# Altium footprint library PcbLib1.PcbLib: 15 footprints
Each footprint in its own frame and in the unit in brackets; x right, y up, seen from the top. Pads: shape width x height; smd on the part's side, far side on the other; paste and mask are expansions set on the pad; w line width, h text height; cw(c..) or ccw(c..) is an arc to the next point about the centre after c.
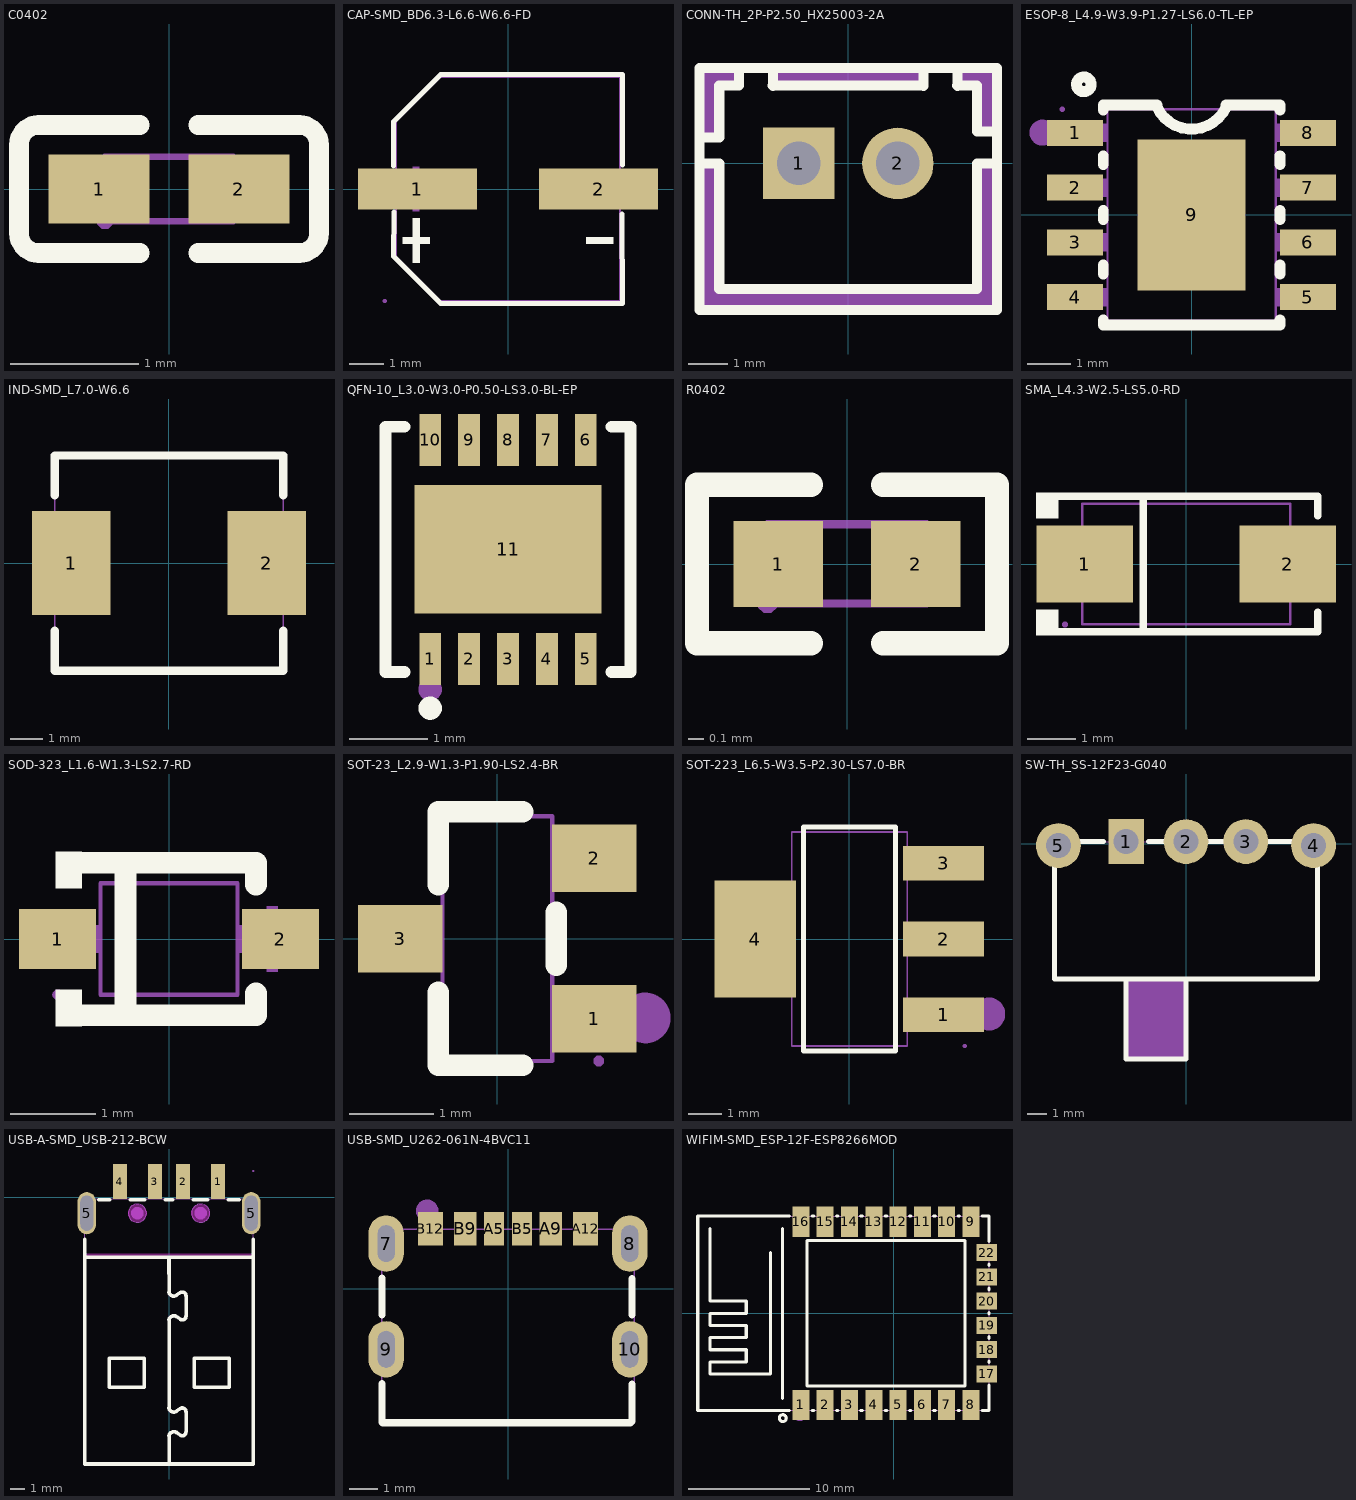
[diagram p0: the footprints below, top view; thin cyan lines are the x and y axes]

## C0402 [mm]
pads (2):
  rect 0.79x0.54 smd paste-100 mask+0.051: 1(-0.545,0) 2(0.545,0)
Top Overlay:
  lines w0.152: -0.226,-0.499 -1.016,-0.499 cw(c-1.016,-0.346) -1.169,-0.346 -1.169,0.346 cw(c-1.016,0.346) -1.016,0.499 -0.226,0.499 ; 0.226,-0.499 1.016,-0.499 ccw(c1.016,-0.346) 1.169,-0.346 1.169,0.346 ccw(c1.016,0.346) 1.016,0.499 0.226,0.499
Top Paste:
  region: 0.78,0.225 0.78,-0.225 0.73,-0.275 0.25,-0.275 0.18,-0.225 0.18,0.225 0.25,0.275 0.73,0.275
  region: -0.18,0.225 -0.18,-0.225 -0.25,-0.275 -0.73,-0.275 -0.78,-0.225 -0.78,0.225 -0.73,0.275 -0.25,0.275
Mechanical 15:
  region: -0.44,-0.25 -0.44,-0.225 -0.475,-0.19 -0.525,-0.19 -0.56,-0.225 -0.56,-0.25 -0.56,-0.275 -0.525,-0.31 -0.475,-0.31 -0.44,-0.275
  region: 0.5,-0.25 0.5,0.25 0.25,0.25 0.25,-0.25
  region: -0.5,-0.25 -0.5,0.25 -0.25,0.25 -0.25,-0.25
  lines w0.051: -0.5,-0.25 0.5,-0.25 0.5,0.25 -0.5,0.25 -0.5,-0.25

## CAP-SMD_BD6.3-L6.6-W6.6-FD [mm]
pads (2):
  rect 3.5x1.2 smd: 1(-2.67,0) 2(2.67,0)
Top Overlay:
  region: -2.805,-0.858 -2.805,-2.178 -2.607,-2.178 -2.607,-0.858
  region: -3.102,-1.419 -3.102,-1.617 -2.31,-1.617 -2.31,-1.419
  region: 3.102,-1.419 3.102,-1.617 2.31,-1.617 2.31,-1.419
  lines w0.152: -3.376,0.686 -3.376,1.98 -1.98,3.376 3.376,3.376 3.369,0.708 ; -3.362,-0.686 -3.376,-1.981 -1.981,-3.376 3.376,-3.376 3.356,-0.739
Mechanical 6:
  region: -2.81,0.66 -2.81,-0.66 -2.612,-0.66 -2.612,0.66
  region: -3.102,0.099 -3.102,-0.099 -2.31,-0.099 -2.31,0.099
  region: 3.102,0.099 3.102,-0.099 2.31,-0.099 2.31,0.099
Mechanical 15:
  region: -3.634,0.325 -1.034,0.325 -1.034,-0.325 -3.634,-0.325
  region: 1.067,0.325 3.667,0.325 3.667,-0.325 1.067,-0.325
  region: -3.574,-3.3 -3.575,-3.276 -3.61,-3.242 -3.658,-3.242 -3.693,-3.276 -3.694,-3.3 -3.693,-3.324 -3.658,-3.358 -3.61,-3.358 -3.575,-3.324
  lines w0.051: -3.3,-1.98 -3.3,1.98 -1.98,3.3 3.3,3.3 3.3,-3.3 -1.98,-3.3 -3.3,-1.98

## CONN-TH_2P-P2.50_HX25003-2A [mm]
pads (2):
  rect 1.8x1.8 hole 1.1 paste+0 mask+0.05: 1(-1.25,0)
  round 1.8 hole 1.1 paste+0 mask+0.05: 2(1.25,0)
Top Overlay:
  lines w0.254: -3.75,-2.416 -3.75,0 -3.25,0 -3.25,-2.416 -3.25,-3.167 3.25,-3.167 3.25,-2.344 3.25,0 3.75,0 3.75,-2.344 ; -3.75,-1.603 -3.75,0.648 -3.25,0.65 -3.25,1.958 -2.75,1.958 -2.75,2.408 ; -1.9,1.95 -1.9,2.4 ; -1.9,1.958 1.9,1.958 ; 1.9,1.95 1.9,2.4 ; 2.75,1.95 2.75,2.399 ; 2.75,1.958 3.25,1.958 3.25,0.8 3.75,0.8 3.75,-1.501 ; -3.75,-3.7 -3.75,2.4 3.75,2.4 3.75,-3.7 -3.75,-3.7
Mechanical 6:
  region: 1.9,2.4 1.9,1.9 -1.9,1.9 -1.9,2.4
  region: 3.25,0 3.75,0 3.75,-3.7 -3.75,-3.7 -3.75,-0.05 -3.25,0 -3.25,-3.167 3.25,-3.167
  region: -2.75,1.9 -3.241,1.9 -3.25,1.908 -3.25,0.75 -3.75,0.75 -3.75,2.35 -2.751,2.35 -2.75,2.349
  region: 2.75,1.95 3.242,1.95 3.25,1.958 3.25,0.8 3.75,0.8 3.75,2.4 2.751,2.4 2.75,2.399
Mechanical 15:
  region: -3.69,-3.5 -3.69,-3.475 -3.725,-3.44 -3.775,-3.44 -3.81,-3.475 -3.81,-3.5 -3.81,-3.525 -3.775,-3.56 -3.725,-3.56 -3.69,-3.525
  region: -1.57,0.32 -0.93,0.32 -0.93,-0.32 -1.57,-0.32
  region: 0.93,0.32 1.57,0.32 1.57,-0.32 0.93,-0.32
  lines w0.051: -3.75,-3.5 3.75,-3.5 3.75,2.4 -3.75,2.4 -3.75,-3.5

## ESOP-8_L4.9-W3.9-P1.27-LS6.0-TL-EP [mm]
pads (9):
  rect 1.3x0.6 smd: 1(-2.7,1.905) 2(-2.7,0.635) 3(-2.7,-0.635) 4(-2.7,-1.905) 5(2.7,-1.905) 6(2.7,-0.635) 7(2.7,0.635) 8(2.7,1.905)
  rect 2.5x3.5 smd: 9(0,0)
Top Overlay:
  circle w0.254: c-2.5,3.03 r0.17
  lines w0.254: -2.05,-2.436 -2.05,-2.55 2.05,-2.55 2.05,-2.436 ; -2.05,-1.374 -2.05,-1.166 ; -2.05,-0.104 -2.05,0.104 ; -2.05,1.166 -2.05,1.374 ; -2.05,2.436 -2.05,2.55 -0.8,2.55 ; -0.8,2.5 ccw(c0,2.875) 0.8,2.5 ; 0.8,2.55 2.05,2.55 2.05,2.436 ; 2.05,-1.374 2.05,-1.166 ; 2.05,-0.104 2.05,0.104 ; 2.05,1.166 2.05,1.374
Mechanical 6:
  circle w0.3: c-3.46,1.91 r0.15
Mechanical 15:
  region: -1.206,-1.65 -1.206,1.65 1.206,1.65 1.206,-1.65
  region: -3,2.115 -2.165,2.115 -2.165,1.695 -3,1.695
  region: -2.175,2.115 -1.94,2.115 -1.94,1.695 -2.175,1.695
  region: -3,0.845 -2.165,0.845 -2.165,0.425 -3,0.425
  region: -2.175,0.845 -1.94,0.845 -1.94,0.425 -2.175,0.425
  region: -3,-0.425 -2.165,-0.425 -2.165,-0.845 -3,-0.845
  region: -2.175,-0.425 -1.94,-0.425 -1.94,-0.845 -2.175,-0.845
  region: -3,-1.695 -2.165,-1.695 -2.165,-2.115 -3,-2.115
  region: -2.175,-1.695 -1.94,-1.695 -1.94,-2.115 -2.175,-2.115
  region: 2.165,-1.695 3,-1.695 3,-2.115 2.165,-2.115
  region: 1.94,-1.695 2.175,-1.695 2.175,-2.115 1.94,-2.115
  region: 2.165,-0.425 3,-0.425 3,-0.845 2.165,-0.845
  region: 1.94,-0.425 2.175,-0.425 2.175,-0.845 1.94,-0.845
  region: 2.165,0.845 3,0.845 3,0.425 2.165,0.425
  region: 1.94,0.845 2.175,0.845 2.175,0.425 1.94,0.425
  region: 2.165,2.115 3,2.115 3,1.695 2.165,1.695
  region: 1.94,2.115 2.175,2.115 2.175,1.695 1.94,1.695
  region: -2.94,2.45 -2.94,2.475 -2.975,2.509 -3.024,2.509 -3.059,2.475 -3.06,2.45 -3.059,2.426 -3.024,2.391 -2.975,2.391 -2.94,2.426 -2.94,2.45
  lines w0.051: -1.95,-2.45 -1.95,2.45 1.95,2.45 1.95,-2.45 -1.95,-2.45

## IND-SMD_L7.0-W6.6 [mm]
pads (2):
  rect 2.4x3.2 smd: 1(-3,0) 2(3,0)
Top Overlay:
  lines w0.254: -3.5,-2.081 -3.5,-3.3 -3.49,-3.3 3.5,-3.3 3.5,-2.081 ; -3.5,2.081 -3.5,3.3 3.48,3.3 3.5,3.28 ; 3.5,2.081 3.5,3.3
Mechanical 15:
  region: -1.9,-1.5 -3.5,-1.5 -3.5,1.5 -1.9,1.5
  region: 1.9,1.5 3.5,1.5 3.5,-1.5 1.9,-1.5
  region: -3.44,-3.3 -3.44,-3.275 -3.475,-3.24 -3.525,-3.24 -3.56,-3.275 -3.56,-3.3 -3.56,-3.325 -3.525,-3.36 -3.475,-3.36 -3.44,-3.325 -3.44,-3.3
  lines w0.051: -3.5,-3.3 3.5,-3.3 3.5,3.3 -3.5,3.3 -3.5,-3.3

## QFN-10_L3.0-W3.0-P0.50-LS3.0-BL-EP [mm]
pads (11):
  rect 0.28x0.665 smd paste+0 mask+0.051: 1(475.529,-432.505) 2(476.029,-432.505) 3(476.529,-432.505) 4(477.029,-432.505) 5(477.529,-432.505) 6(477.529,-429.69) 7(477.029,-429.69) 8(476.529,-429.69) 9(476.029,-429.69) 10(475.529,-429.69)
  rect 2.4x1.65 smd paste+0 mask+0.051: 11(476.529,-431.097)
Top Overlay:
  circle w0.15: c475.529,-433.137 r0.075
  lines w0.152: 475.199,-432.673 474.953,-432.673 474.953,-429.521 475.199,-429.521 ; 477.86,-432.673 478.105,-432.673 478.105,-429.521 477.86,-429.521
Mechanical 15:
  circle w0.15: c475.529,-432.897 r0.075

## R0402 [mm]
pads (2):
  rect 0.566x0.54 smd paste-100 mask+0.051: 1(-0.433,0) 2(0.433,0)
Top Overlay:
  lines w0.152: -0.226,-0.499 -0.944,-0.499 -0.944,0.499 -0.226,0.499 ; 0.226,-0.499 0.944,-0.499 0.944,0.499 0.226,0.499
Top Paste:
  region: -0.135,-0.23 -0.135,0.23 -0.175,0.27 -0.676,0.27 -0.716,0.23 -0.716,-0.23 -0.676,-0.27 -0.175,-0.27
  region: 0.135,-0.23 0.135,0.23 0.175,0.27 0.676,0.27 0.716,0.23 0.716,-0.23 0.676,-0.27 0.175,-0.27
Mechanical 15:
  region: -0.44,-0.25 -0.441,-0.226 -0.476,-0.192 -0.524,-0.192 -0.559,-0.226 -0.56,-0.25 -0.559,-0.274 -0.524,-0.308 -0.476,-0.308 -0.441,-0.274
  region: -0.249,0.25 -0.249,-0.25 -0.499,-0.25 -0.499,0.25
  region: 0.251,-0.25 0.251,0.25 0.501,0.25 0.501,-0.25
  lines w0.051: -0.5,-0.25 0.5,-0.25 0.5,0.25 -0.5,0.25 -0.5,-0.25

## SMA_L4.3-W2.5-LS5.0-RD [mm]
pads (2):
  rect 2x1.593 smd: 1(-2.1,0) 2(2.1,0)
Top Overlay:
  region: -2.65,1.477 -2.65,0.949 -3.107,0.949 -3.107,1.477
  region: -2.65,-1.477 -2.65,-0.949 -3.107,-0.949 -3.107,-1.477
  lines w0.152: -2.726,-1.401 2.726,-1.401 2.726,-1 ; -2.726,1.401 2.726,1.401 2.726,1 ; -0.886,-1.401 -0.886,1.401
Mechanical 6:
  region: -2.451,-0.099 -2.451,0.099 -1.656,0.099 -1.656,-0.099
  region: 2.451,-0.099 2.451,0.099 1.656,0.099 1.656,-0.099
  region: 2.153,-0.663 2.153,0.663 1.954,0.663 1.954,-0.663
Mechanical 15:
  region: -2.447,-1.25 -2.447,-1.225 -2.482,-1.19 -2.532,-1.19 -2.567,-1.225 -2.567,-1.25 -2.567,-1.275 -2.532,-1.31 -2.482,-1.31 -2.447,-1.275 -2.447,-1.25
  region: -1.307,0.725 -1.307,-0.725 -2.507,-0.725 -2.507,0.725
  region: 1.307,-0.725 1.307,0.725 2.507,0.725 2.507,-0.725
  lines w0.051: -2.15,-1.25 -2.15,1.25 2.15,1.25 2.15,-1.25 -2.15,-1.25

## SOD-323_L1.6-W1.3-LS2.7-RD [mm]
pads (2):
  rect 0.9x0.7 smd paste+0 mask+0.05: 1(-1.3,0) 2(1.3,0)
Top Overlay:
  region: -1.016,1.016 -1.016,0.593 -1.321,0.593 -1.321,1.016
  region: -1.016,-1.016 -1.016,-0.593 -1.321,-0.593 -1.321,-1.016
  lines w0.254: -1.143,-0.889 -0.728,-0.889 ; -1.143,0.889 -0.889,0.889 0.889,0.889 1.016,0.889 1.016,0.635 ; -0.889,-0.889 0.889,-0.889 ; -0.508,-0.889 -0.508,0.889 ; 0.763,-0.889 1.016,-0.889 1.016,-0.635
Mechanical 6:
  region: 0.826,0.064 1.587,0.064 1.587,-0.064 0.826,-0.064
  region: 1.143,-0.381 1.143,0.381 1.27,0.381 1.27,-0.381
  region: -1.651,0 -0.889,0 -0.889,-0.127 -1.651,-0.127
Mechanical 15:
  region: 1.025,-0.163 1.025,0.163 1.35,0.163 1.35,-0.163
  region: 0.79,-0.163 0.79,0.163 1.035,0.163 1.035,-0.163
  region: -1.35,-0.163 -1.35,0.163 -1.025,0.163 -1.025,-0.163
  region: -1.035,-0.163 -1.035,0.163 -0.79,0.163 -0.79,-0.163
  region: -1.24,-0.65 -1.241,-0.626 -1.276,-0.593 -1.324,-0.593 -1.359,-0.626 -1.36,-0.65 -1.359,-0.674 -1.324,-0.707 -1.276,-0.707 -1.241,-0.674
  lines w0.051: -0.8,-0.65 0.8,-0.65 0.8,0.65 -0.8,0.65 -0.8,-0.65

## SOT-23_L2.9-W1.3-P1.90-LS2.4-BR [mm]
pads (3):
  rect 1x0.8 smd: 1(1.15,-0.95) 2(1.15,0.95) 3(-1.15,0)
Top Overlay:
  lines w0.254: -0.7,-0.636 -0.7,-1.5 0.3,-1.5 ; -0.7,0.636 -0.7,1.5 0.3,1.5 ; 0.7,-0.314 0.7,0.314
Mechanical 6:
  circle w0.3: c1.753,-0.94 r0.15
Mechanical 15:
  region: -1.2,-0.2 -1.2,0.2 -0.8,0.2 -0.8,-0.2
  region: -0.81,-0.2 -0.81,0.2 -0.64,0.2 -0.64,-0.2
  region: 0.8,0.75 0.8,1.15 1.2,1.15 1.2,0.75
  region: 0.64,0.75 0.64,1.15 0.81,1.15 0.81,0.75
  region: 0.8,-1.15 0.8,-0.75 1.2,-0.75 1.2,-1.15
  region: 0.64,-1.15 0.64,-0.75 0.81,-0.75 0.81,-1.15
  region: 1.26,-1.45 1.26,-1.425 1.225,-1.39 1.175,-1.39 1.14,-1.425 1.14,-1.45 1.14,-1.475 1.175,-1.51 1.225,-1.51 1.26,-1.475
  lines w0.051: -0.65,-1.45 0.65,-1.45 0.65,1.45 -0.65,1.45 -0.65,-1.45

## SOT-223_L6.5-W3.5-P2.30-LS7.0-BR [mm]
pads (4):
  rect 2.465x1.05 smd: 1(2.857,-2.3) 2(2.857,0) 3(2.857,2.3)
  rect 2.465x3.54 smd: 4(-2.857,0)
Top Overlay:
  lines w0.152: -1.396,-3.401 1.396,-3.401 1.396,3.401 -1.396,3.401 -1.396,-3.401
Mechanical 6:
  circle w0.5: c4.229,-2.277 r0.25
Mechanical 15:
  region: -3.5,-1.5 -3.5,1.5 -2.2,1.5 -2.2,-1.5
  region: -2.21,-1.5 -2.21,1.5 -1.74,1.5 -1.74,-1.5
  region: 2.85,-2.65 2.85,-1.95 3.5,-1.95 3.5,-2.65
  region: 1.74,-2.65 1.74,-1.95 2.86,-1.95 2.86,-2.65
  region: 2.85,-0.35 2.85,0.35 3.5,0.35 3.5,-0.35
  region: 1.74,-0.35 1.74,0.35 2.86,0.35 2.86,-0.35
  region: 2.85,1.95 2.85,2.65 3.5,2.65 3.5,1.95
  region: 1.74,1.95 1.74,2.65 2.86,2.65 2.86,1.95
  region: 3.56,-3.25 3.559,-3.226 3.524,-3.192 3.476,-3.192 3.441,-3.226 3.44,-3.25 3.441,-3.274 3.476,-3.308 3.524,-3.308 3.559,-3.274
  lines w0.051: -1.75,-3.25 -1.75,3.25 1.75,3.25 1.75,-3.25 -1.75,-3.25

## SW-TH_SS-12F23-G040 [mm]
pads (5):
  rect 1.8x2.25 hole 1.25 paste+0 mask+0.05: 1(-3,0.1)
  round 2.25 hole 1.25 paste+0 mask+0.05: 2(0,0.1) 3(3,0.1) 4(6.4,-0.1) 5(-6.4,-0.1)
Top Overlay:
  lines w0.254: -6.6,-0.899 -6.6,-6.8 6.6,-6.8 6.604,-0.895 ; -5.287,0.1 -4.687,0.1 -4.131,0.1 ; -3.005,-6.8 -3.005,-10.8 -0.005,-10.8 -0.005,-6.8 ; -1.869,0.1 -1.131,0.1 ; 1.131,0.1 1.869,0.1 ; 4.131,0.1 4.687,0.1 5.287,0.1
Mechanical 6:
  region: 0.05,-6.81 0.05,-10.77 -3.04,-10.77 -3.04,-6.81
Mechanical 15:
  region: 6.2,-0.5 6.2,0.3 6.6,0.3 6.6,-0.5
  region: -6.6,-0.5 -6.6,0.3 -6.2,0.3 -6.2,-0.5
  region: 2.6,0.3 3.4,0.3 3.4,-0.1 2.6,-0.1
  region: -0.4,0.3 0.4,0.3 0.4,-0.1 -0.4,-0.1
  region: -3.4,-0.1 -3.4,0.3 -2.6,0.3 -2.6,-0.1
  region: -6.54,0.3 -6.54,0.325 -6.575,0.36 -6.625,0.36 -6.66,0.325 -6.66,0.3 -6.66,0.275 -6.625,0.24 -6.575,0.24 -6.54,0.275
  lines w0.051: -6.595,-6.76 -6.595,0.1 6.595,0.1 6.595,-6.76 -0.005,-6.76 -0.005,-10.74 -0.015,-10.74 -2.995,-10.75 -2.995,-6.76 -6.595,-6.76

## USB-A-SMD_USB-212-BCW [mm]
pads (6):
  rect 1x2.5 smd paste-100 mask+0.051: 1(3.5,1.125) 2(1,1.125) 3(-1,1.125) 4(-3.5,1.125)
  oval 1.3x3 hole 0.9 slot 2.5 at 90 deg: 5(-5.85,-1.125) 5(5.85,-1.125)
Top Overlay:
  lines w0.254: -6,-4.272 6,-4.272 ; -6,-2.991 -6,-18.972 6,-18.972 6,-4.272 ; -5.005,-0.172 -4.231,-0.172 ; -2.769,-0.172 -1.731,-0.172 ; -0.269,-0.172 0.269,-0.172 ; -0.002,-16.968 cw(c0.337,-17.024) 0.534,-16.742 ; -0.002,-14.989 ccw(c0.337,-14.933) 0.534,-15.215 ; -0.002,-8.718 cw(c0.337,-8.774) 0.534,-8.492 ; -0.002,-6.739 ccw(c0.337,-6.683) 0.534,-6.965 ; 0,-4.272 0.008,-6.731 ; 0.008,-18.972 0.008,-16.968 ; 0.008,-14.986 0.008,-8.713 ; 0.541,-16.714 0.541,-16.739 0.795,-16.917 ; 0.541,-15.215 0.795,-15.037 ; 0.541,-8.484 0.795,-8.662 ; 0.541,-6.96 0.795,-6.782 ; 0.798,-16.919 ccw(c0.947,-16.706) 1.207,-16.709 ; 0.798,-15.035 cw(c0.947,-15.248) 1.207,-15.248 ; 0.798,-8.669 ccw(c0.947,-8.456) 1.207,-8.459 ; 0.798,-6.785 cw(c0.947,-6.998) 1.207,-6.998 ; 1.227,-16.688 1.227,-15.24 ; 1.227,-8.459 1.227,-6.985 ; 1.731,-0.172 2.769,-0.172 ; 4.231,-0.172 5.005,-0.172 ; 6,-2.991 6,-4.272 ; -4.259,-13.513 -1.77,-13.513 -1.77,-11.456 -4.259,-11.456 -4.259,-13.513 ; 1.786,-13.513 4.275,-13.513 4.275,-11.456 1.786,-11.456 1.786,-13.513
Top Paste:
  drawing of 6 lines, arcs and shapes, not listed
Keep-Out Layer:
  board cut-out: 2.9,-1.125 2.9,-1.039 2.856,-0.874 2.77,-0.726 2.649,-0.605 2.501,-0.519 2.335,-0.475 2.164,-0.475 1.999,-0.519 1.851,-0.605 1.73,-0.726 1.644,-0.874 1.6,-1.039 1.6,-1.125 1.6,-1.211 1.644,-1.376 1.73,-1.524 1.851,-1.645 1.999,-1.731 2.164,-1.775 2.335,-1.775 2.501,-1.731 2.649,-1.645 2.77,-1.524 2.856,-1.376 2.9,-1.211
  board cut-out: -1.6,-1.125 -1.6,-1.039 -1.644,-0.874 -1.73,-0.726 -1.851,-0.605 -1.999,-0.519 -2.165,-0.475 -2.336,-0.475 -2.501,-0.519 -2.649,-0.605 -2.77,-0.726 -2.856,-0.874 -2.9,-1.039 -2.9,-1.125 -2.9,-1.211 -2.856,-1.376 -2.77,-1.524 -2.649,-1.645 -2.501,-1.731 -2.336,-1.775 -2.164,-1.775 -1.999,-1.731 -1.851,-1.645 -1.73,-1.524 -1.644,-1.376 -1.6,-1.211
Keep-Out Layer:
  lines w0.254: -5.969,-4.125 5.969,-4.125 -5.969,-4.125
Mechanical 1:
  circle w0.005: c2.25,-1.125 r0.65
  circle w0.005: c-2.25,-1.125 r0.65
Mechanical 6:
  circle w0.45: c2.25,-1.125 r0.225
  circle w0.45: c-2.25,-1.125 r0.225
Mechanical 15:
  region: 5.75,-0.1 5.95,-0.1 5.95,-2.15 5.75,-2.15
  region: -5.95,-0.1 -5.75,-0.1 -5.75,-2.15 -5.95,-2.15
  region: 3.15,0.873 3.15,1.873 3.85,1.873 3.85,0.873
  region: 3.15,-0.137 3.15,0.883 3.85,0.883 3.85,-0.137
  region: 0.65,0.873 0.65,1.873 1.35,1.873 1.35,0.873
  region: 0.65,-0.137 0.65,0.883 1.35,0.883 1.35,-0.137
  region: -1.35,0.873 -1.35,1.873 -0.65,1.873 -0.65,0.873
  region: -1.35,-0.137 -1.35,0.883 -0.65,0.883 -0.65,-0.137
  region: -3.85,0.873 -3.85,1.873 -3.15,1.873 -3.15,0.873
  region: -3.85,-0.137 -3.85,0.883 -3.15,0.883 -3.15,-0.137
  region: 6.06,1.873 6.059,1.897 6.024,1.93 5.976,1.93 5.941,1.897 5.94,1.873 5.941,1.849 5.976,1.815 6.024,1.815 6.059,1.849
  lines w0.051: -6,-18.914 6,-18.914 6,-0.114 -6,-0.114 -6,-18.914

## USB-SMD_U262-061N-4BVC11 [mm]
pads (10):
  oval 1.25x2 hole 0.6 slot 1.3 at 90 deg paste+0 mask+0.05: 7(-4.32,1.611) 8(4.32,1.611) 9(-4.32,-2.139) 10(4.32,-2.139)
  rect 0.7x1.2 smd paste-100 mask+0.05: A5(-0.5,2.139) B5(0.5,2.139)
  rect 0.8x1.2 smd paste-100 mask+0.05: A9(1.52,2.139) B9(-1.52,2.139)
  rect 0.9x1.2 smd paste-100 mask+0.05: A12(2.75,2.139) B12(-2.75,2.139)
Top Overlay:
  lines w0.254: -4.467,-3.357 -4.467,-4.733 -4.455,-4.746 4.346,-4.746 4.397,-4.695 4.397,-3.367 ; -4.467,-0.921 -4.467,0.393 ; 4.397,-0.911 4.397,0.372
Top Paste:
  drawing of 10 lines, arcs and shapes, not listed
Mechanical 6:
  circle w0.4: c-2.869,2.773 r0.2
Mechanical 15:
  region: -4.415,2.377 -4.416,2.401 -4.45,2.435 -4.499,2.435 -4.534,2.401 -4.535,2.377 -4.534,2.352 -4.499,2.318 -4.45,2.318 -4.416,2.352
  region: 4.17,2.011 4.47,2.011 4.47,1.211 4.17,1.211
  region: -4.47,2.011 -4.17,2.011 -4.17,1.211 -4.47,1.211
  region: -4.47,-1.739 -4.17,-1.739 -4.17,-2.539 -4.47,-2.539
  region: 4.17,-1.739 4.47,-1.739 4.47,-2.539 4.17,-2.539
  region: -3.05,2.377 -2.45,2.377 -2.45,1.577 -3.05,1.577
  region: -1.82,2.377 -1.22,2.377 -1.22,1.577 -1.82,1.577
  region: 1.22,2.377 1.82,2.377 1.82,1.577 1.22,1.577
  region: 2.45,2.377 3.05,2.377 3.05,1.577 2.45,1.577
  region: 0.22,2.377 0.78,2.377 0.78,1.577 0.22,1.577
  region: -0.78,2.377 -0.22,2.377 -0.22,1.577 -0.78,1.577
  lines w0.051: -4.475,-4.739 -4.475,2.111 4.475,2.111 4.475,-4.739 -4.475,-4.739

## WIFIM-SMD_ESP-12F-ESP8266MOD [mm]
pads (22):
  rect 1.4x2.5 smd: 1(-7.651,-7.551) 2(-5.651,-7.551) 3(-3.651,-7.551) 4(-1.651,-7.551) 5(0.349,-7.551) 6(2.349,-7.551) 7(4.349,-7.551) 8(6.349,-7.551) 9(6.349,7.549) 10(4.349,7.55) 11(2.349,7.551) 12(0.349,7.551) 13(-1.651,7.55) 14(-3.651,7.551) 15(-5.651,7.55) 16(-7.651,7.551)
  rect 1.7x1.4 smd: 17(7.651,-5) 18(7.649,-3.002) 19(7.65,-1.003) 20(7.65,0.997) 21(7.65,2.997) 22(7.65,4.997)
Top Overlay:
  circle w0.254: c-9.144,-8.636 r0.284
  lines w0.254: -15.151,6.998 -15.151,0.998 -12.151,0.998 -12.151,-0.002 -15.151,-0.002 -15.151,-1.002 -12.151,-1.002 -12.151,-2.002 -15.151,-2.002 -15.151,-3.002 -12.151,-3.002 -12.151,-4.002 -15.151,-4.002 -15.151,-5.002 -10.151,-5.002 -10.151,4.998 ; -9.151,-7.002 -9.151,6.998 ; -8.582,-8.001 -16.151,-8.001 -16.151,7.998 -8.582,7.998 ; -6.719,-8.001 -6.582,-8.001 ; -6.719,7.998 -6.582,7.998 ; -4.719,-8.001 -4.582,-8.001 ; -4.719,7.998 -4.582,7.998 ; -2.719,-8.001 -2.582,-8.001 ; -2.719,7.998 -2.582,7.998 ; -0.719,-8.001 -0.582,-8.001 ; -0.719,7.998 -0.582,7.998 ; 1.281,-8.001 1.418,-8.001 ; 1.281,7.998 1.418,7.998 ; 3.281,-8.001 3.418,-8.001 ; 3.281,7.998 3.418,7.998 ; 5.281,-8.001 5.418,-8.001 ; 5.281,7.998 5.418,7.998 ; 7.281,-8.001 7.847,-8.001 7.847,-5.931 ; 7.281,7.998 7.847,7.998 7.847,5.928 ; 7.847,-4.069 7.847,-3.933 ; 7.847,-2.071 7.847,-1.934 ; 7.847,-0.072 7.847,0.066 ; 7.847,1.929 7.847,2.066 ; 7.847,3.928 7.847,4.066 ; -7.151,-6.002 5.849,-6.002 5.849,5.998 -7.151,5.998 -7.151,-6.002
Mechanical 6:
  circle w0.5: c-7.747,-8.382 r0.25
Mechanical 15:
  region: -16.091,-8.003 -16.091,-7.978 -16.126,-7.943 -16.176,-7.943 -16.211,-7.978 -16.211,-8.003 -16.211,-8.028 -16.176,-8.063 -16.126,-8.063 -16.091,-8.028
  region: -7.151,-6.35 -7.151,-8 -8.151,-8 -8.151,-6.35
  region: -5.151,-6.35 -5.151,-8 -6.151,-8 -6.151,-6.35
  region: -3.151,-6.35 -3.151,-8 -4.151,-8 -4.151,-6.35
  region: -1.151,-6.35 -1.151,-8 -2.151,-8 -2.151,-6.35
  region: 0.849,-6.35 0.849,-8 -0.151,-8 -0.151,-6.35
  region: 2.849,-6.35 2.849,-8 1.849,-8 1.849,-6.35
  region: 4.849,-6.35 4.849,-8 3.849,-8 3.849,-6.35
  region: 6.849,-6.35 6.849,-8 5.849,-8 5.849,-6.35
  region: 5.849,6.35 5.849,8 6.849,8 6.849,6.35
  region: 3.849,6.35 3.849,8 4.849,8 4.849,6.35
  region: 1.849,6.35 1.849,8 2.849,8 2.849,6.35
  region: -0.151,6.35 -0.151,8 0.849,8 0.849,6.35
  region: -2.151,6.35 -2.151,8 -1.151,8 -1.151,6.35
  region: -4.151,6.35 -4.151,8 -3.151,8 -3.151,6.35
  region: -6.151,6.35 -6.151,8 -5.151,8 -5.151,6.35
  region: -8.151,6.35 -8.151,8 -7.151,8 -7.151,6.35
  region: 7.849,-4.5 7.849,-5.5 6.949,-5.5 6.949,-4.5
  region: 7.849,-2.502 7.849,-3.502 6.949,-3.502 6.949,-2.502
  region: 7.849,-0.503 7.849,-1.503 6.949,-1.503 6.949,-0.503
  region: 7.849,1.498 7.849,0.498 6.949,0.498 6.949,1.498
  region: 7.849,3.497 7.849,2.497 6.949,2.497 6.949,3.497
  region: 7.849,5.497 7.849,4.497 6.949,4.497 6.949,5.497
  lines w0.051: -16.151,-8.003 7.849,-8.003 7.849,7.997 -16.151,7.997 -16.151,-8.003